# Altium integrated library ERA6VRB1001V.IntLib: 1 symbol
Pins are listed as number, name and electrical type; pins without a type are passive.

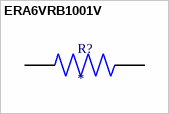
[diagram p0: symbol ERA6VRB1001V]

## ERA6VRB1001V
designator R?
MP: ERA6VRB1001V; Value: *; Availability: Unavailable; Price: None; Package: None
footprint RES_ERA6VRB1001V
pins: 1, 2